# Altium footprint library DIM.PcbLib: 183 footprints (part 9 of 12)
Each footprint in its own frame and in the unit in brackets; x right, y up, seen from the top. Pads: shape width x height; smd on the part's side, far side on the other; paste and mask are expansions set on the pad; w line width, h text height; cw(c..) or ccw(c..) is an arc to the next point about the centre after c.
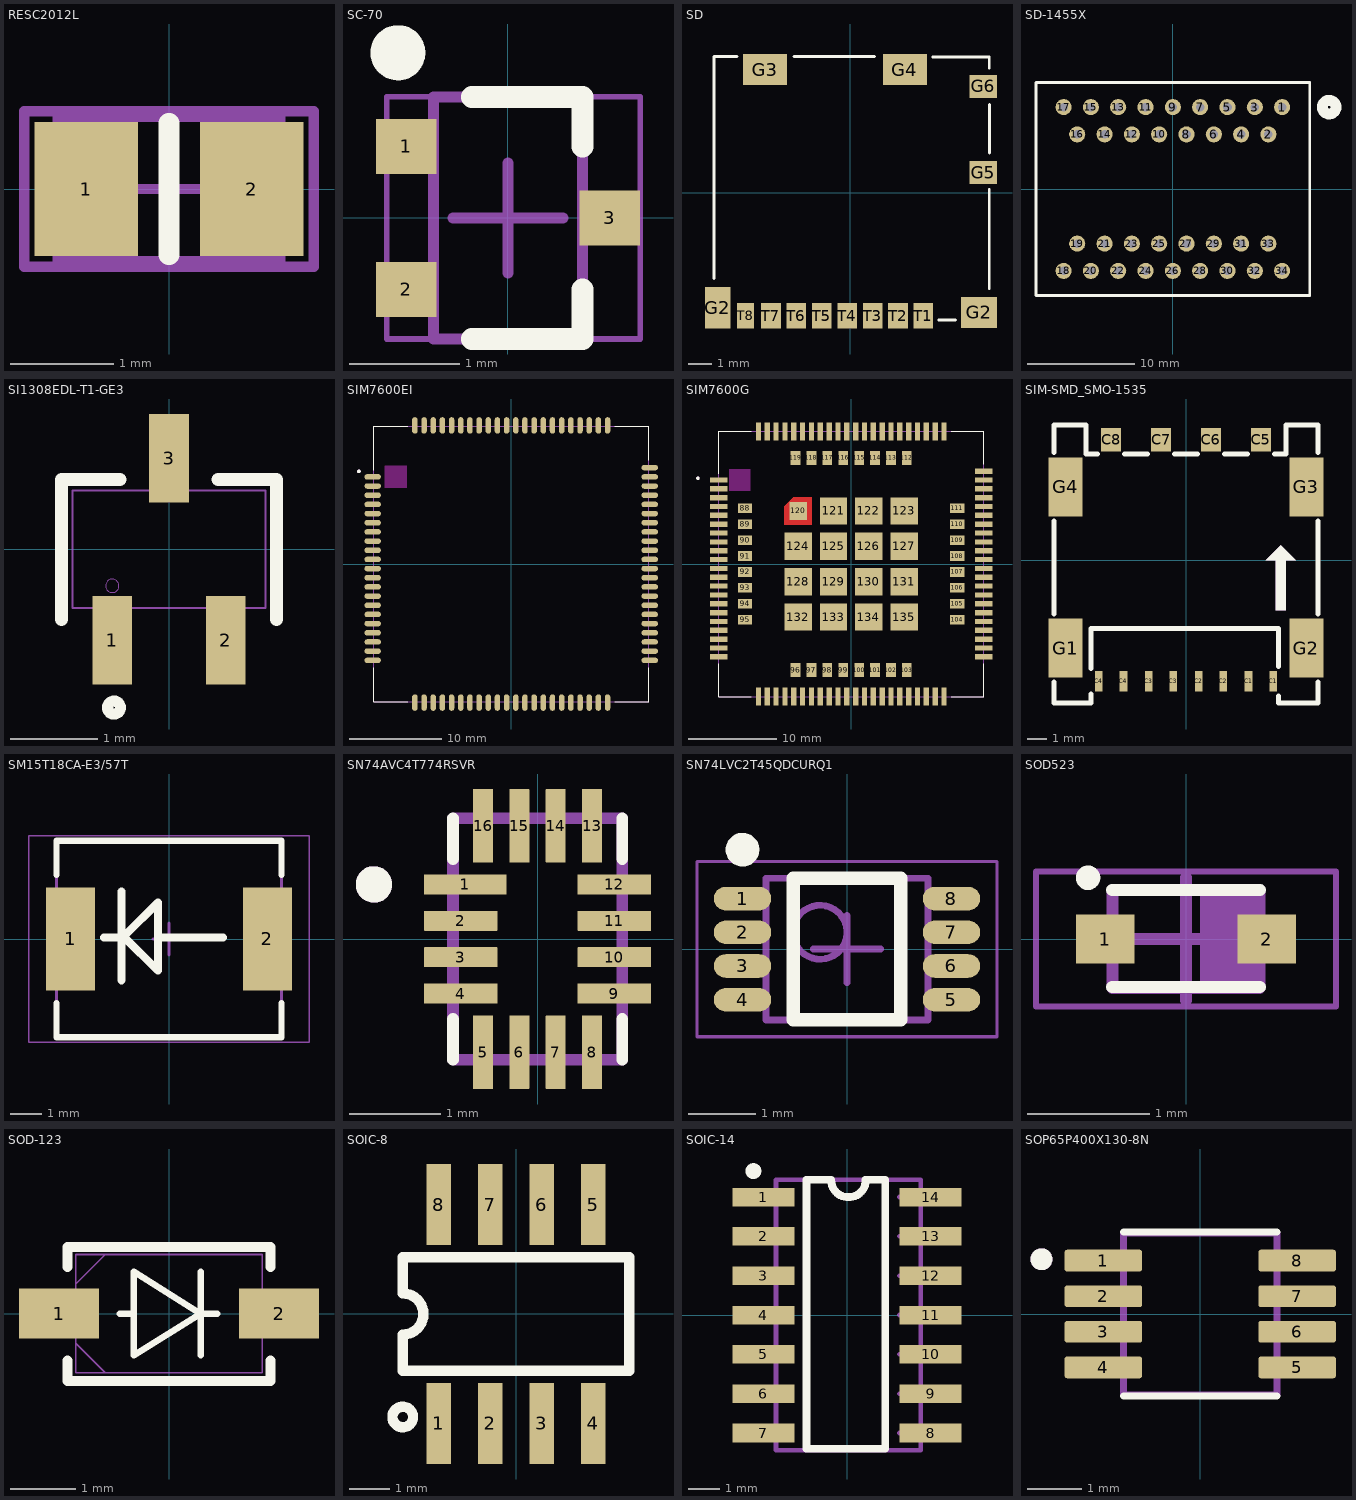
[diagram p8: the footprints below, top view; thin cyan lines are the x and y axes]

## RESC2012L [mm] "Chip Resistor, Body 2.0x1.3mm, IPC High Density"
height 0.65
pads (2):
  rect 1x1.3 smd: 1(-0.8,0) 2(0.8,0)
Top Overlay:
  lines w0.2: 0,-0.635 0,0.635
Mechanical 13:
  lines w0.1: -1.075,-0.7 1.075,-0.7 1.075,0.7 -1.075,0.7 -1.075,-0.7
Mechanical 15:
  lines w0.1: -0.5,0 0.5,0 ; 0,-0.5 0,0.5 ; -1.4,-0.75 1.4,-0.75 1.4,0.75 -1.4,0.75 -1.4,-0.75
3D body: height 0.65, standoff 0, extent -1.075,-0.7 1.075,0.7

## SC-70 [mm]
height 1.1
pads (3):
  rect 0.55x0.5 smd: 1(-0.925,0.65) 2(-0.925,-0.65) 3(0.925,0)
Top Overlay:
  circle w0.25: c-1,1.5 r0.125
  lines w0.2: -0.325,-1.1 0.675,-1.1 0.675,-0.65 ; -0.325,1.1 0.675,1.1 0.675,0.65
Mechanical 13:
  lines w0.1: -0.675,-1.1 -0.675,1.1 0.675,1.1 0.675,-1.1 -0.675,-1.1
Mechanical 15:
  lines w0.05: -1.1,-1.1 -1.1,1.1 1.2,1.1 1.2,-1.1 -1.1,-1.1
  lines w0.1: -0.5,0 0.5,0 ; 0,-0.5 0,0.5
3D body: height 1.1, standoff 0.15, extent -0.675,-1.1 0.675,1.1

## SD [mm]
pads (14):
  rect 1.11x1.8 smd: G2(-5.742,-4.98)
  rect 1.55x1.35 smd: G2(5.568,-5.185)
  rect 1.9x1.35 smd: G3(-3.697,5.325) G4(2.353,5.325)
  rect 1.2x1 smd: G5(5.743,0.865) G6(5.743,4.595)
  rect 0.85x1.1 smd: T1(3.158,-5.325) T2(2.058,-5.325) T3(0.958,-5.325) T4(-0.142,-5.325) T5(-1.242,-5.325) T6(-2.342,-5.325) T7(-3.442,-5.325)
  rect 0.75x1.1 smd: T8(-4.542,-5.325)
Top Overlay:
  lines w0.127: -5.912,-3.72 -5.912,5.895 -4.917,5.895 ; -2.437,5.895 1.033,5.895 ; 3.563,5.88 6.008,5.88 6.008,5.385 ; 3.823,-5.515 4.553,-5.515 ; 6.008,-4.14 6.008,0.135 ; 6.023,1.72 6.023,3.82
3D body "1040310811.stp": height 1.44, standoff -0.01, extent -5.932,-5.52 6.018,5.88

## SD-1455X [mm]
pads (34):
  round 1.5 hole 0.8: 1(10.16,7.62) 2(8.89,5.08) 3(7.62,7.62) 4(6.35,5.08) 5(5.08,7.62) 6(3.81,5.08) 7(2.54,7.62) 8(1.27,5.08) 9(0,7.62) 10(-1.27,5.08) 11(-2.54,7.62) 12(-3.81,5.08) 13(-5.08,7.62) 14(-6.35,5.08) 15(-7.62,7.62) 16(-8.89,5.08) 17(-10.16,7.62) 18(-10.16,-7.62) 19(-8.89,-5.08) 20(-7.62,-7.62) 21(-6.35,-5.08) 22(-5.08,-7.62) 23(-3.81,-5.08) 24(-2.54,-7.62) 25(-1.27,-5.08) 26(0,-7.62) 27(1.27,-5.08) 28(2.54,-7.62) 29(3.81,-5.08) 30(5.08,-7.62) 31(6.35,-5.08) 32(7.62,-7.62) 33(8.89,-5.08) 34(10.16,-7.62)
Top Overlay:
  circle w1: c14.537,7.612 r0.635
  lines w0.254: -12.725,-9.905 -12.725,9.905 ; -12.625,-9.905 12.625,-9.905 ; -12.625,9.905 12.625,9.905 ; 12.725,-9.905 12.725,9.905
3D body: height 5.33, standoff 0, extent -12.611,-9.884 12.613,9.882

## SI1308EDL-T1-GE3 [mil]
pads (3):
  rect 18x40 smd paste+0: 1(-25.59,-41) 2(25.59,-41) 3(0,41)
Top Overlay:
  circle w5: c-24.8,-71.4 r2.9
  lines w6: -48.5,-31.5 -48.5,31.5 -22.1,31.5 ; 22.1,31.5 48.5,31.5 48.5,-31.5
Mechanical 13:
  circle w0: c-25.59,-16.5 r3
  lines w1: -43.5,-26.5 43.5,-26.5 43.5,26.5 -43.5,26.5 -43.5,-26.5 ; -33.59,-47 -33.59,-26.5 -17.59,-26.5 -17.59,-47 -33.59,-47 ; -8,26.5 8,26.5 8,47 -8,47 -8,26.5 ; 17.59,-47 17.59,-26.5 33.59,-26.5 33.59,-47 17.59,-47
3D body "MOSFET_8EDL-T1-GE3_VIS.step": height 39.09, standoff 0, extent -43.5,-47.01 43.5,47.01

## SIM7600EI [mm]
pads (87):
  oval 1.8x0.6 smd: 1(-15.1,9.5) 2(-15.1,8.5) 3(-15.1,7.5) 4(-15.1,6.5) 5(-15.1,5.5) 6(-15.1,4.5) 7(-15.1,3.5) 8(-15.1,2.5) 9(-15.1,1.5) 10(-15.1,0.5) 11(-15.1,-0.5) 12(-15.1,-1.5) 13(-15.1,-2.5) 14(-15.1,-3.5) 15(-15.1,-4.5) 16(-15.1,-5.5) 17(-15.1,-6.5) 18(-15.1,-7.5) 19(-15.1,-8.5) 20(-15.1,-9.5) 41(15.1,-9.5) 42(15.1,-8.5) 43(15.1,-7.5) 44(15.1,-6.5) 45(15.1,-5.5) 46(15.1,-4.5) 47(15.1,-3.5) 48(15.1,-2.5) 49(15.1,-1.5) 50(15.1,-0.5) 51(15.1,0.5) 52(15.1,1.5) 53(15.1,2.5) 54(15.1,3.5) 55(15.1,4.5) 56(15.1,5.5) 57(15.1,6.5) 58(15.1,7.5) 59(15.1,8.5) 60(15.1,9.5) 81(-15.1,-10.5) 82(15.1,-10.5) 85(15.1,10.5)
  oval 0.6x1.8 smd: 21(-9.5,-15.1) 22(-8.5,-15.1) 23(-7.5,-15.1) 24(-6.5,-15.1) 25(-5.5,-15.1) 26(-4.5,-15.1) 27(-3.5,-15.1) 28(-2.5,-15.1) 29(-1.5,-15.1) 30(-0.5,-15.1) 31(0.5,-15.1) 32(1.5,-15.1) 33(2.5,-15.1) 34(3.5,-15.1) 35(4.5,-15.1) 36(5.5,-15.1) 37(6.5,-15.1) 38(7.5,-15.1) 39(8.5,-15.1) 40(9.5,-15.1) 61(9.5,15.1) 62(8.5,15.1) 63(7.5,15.1) 64(6.5,15.1) 65(5.5,15.1) 66(4.5,15.1) 67(3.5,15.1) 68(2.5,15.1) 69(1.5,15.1) 70(0.5,15.1) 71(-0.5,15.1) 72(-1.5,15.1) 73(-2.5,15.1) 74(-3.5,15.1) 75(-4.5,15.1) 76(-5.5,15.1) 77(-6.5,15.1) 78(-7.5,15.1) 79(-8.5,15.1) 80(-9.5,15.1) 83(10.5,-15.1) 84(-10.5,-15.1) 86(-10.5,15.1) 87(10.5,15.1)
Top Overlay:
  circle w0.2: c-16.6,10.1 r0.1
  lines w0.127: -15,-11.3 -15,-15 -11.3,-15 ; -15,10.2 -15,15 -11.3,15 ; 11.3,-15 15,-15 15,-11.3 ; 11.3,15 15,15 15,11.3
Keep-Out Layer:
  region: -11.4,8.3 -13.8,8.3 -13.8,10.7 -11.4,10.7
Mechanical 13:
  circle w0.2: c-16.6,10.1 r0.1
  lines w0.127: -15,-15 15,-15 15,15 -15,15 -15,-15
3D body "SIM7600E-H--3DModel-STEP-56544.STEP": height 3.1, standoff 0, extent -15,-15 15,15

## SIM7600G [mm]
pads (135):
  rect 2x0.6 smd paste-2: 1(-15,9.5) 2(-15,8.5) 3(-15,7.5) 4(-15,6.5) 5(-15,5.5) 6(-15,4.5) 7(-15,3.5) 8(-15,2.5) 9(-15,1.5) 10(-15,0.5) 11(-15,-0.5) 12(-15,-1.5) 13(-15,-2.5) 14(-15,-3.5) 15(-15,-4.5) 16(-15,-5.5) 17(-15,-6.5) 18(-15,-7.5) 19(-15,-8.5) 20(-15,-9.5) 41(15,-9.5) 42(15,-8.5) 43(15,-7.5) 44(15,-6.5) 45(15,-5.5) 46(15,-4.5) 47(15,-3.5) 48(15,-2.5) 49(15,-1.5) 50(15,-0.5) 51(15,0.5) 52(15,1.5) 53(15,2.5) 54(15,3.5) 55(15,4.5) 56(15,5.5) 57(15,6.5) 58(15,7.5) 59(15,8.5) 60(15,9.5) 81(-15,-10.5) 82(15,-10.5) 85(15,10.5)
  rect 0.6x2 smd paste-2: 21(-9.5,-15) 22(-8.5,-15) 23(-7.5,-15) 24(-6.5,-15) 25(-5.5,-15) 26(-4.5,-15) 27(-3.5,-15) 28(-2.5,-15) 29(-1.5,-15) 30(-0.5,-15) 31(0.5,-15) 32(1.5,-15) 33(2.5,-15) 34(3.5,-15) 35(4.5,-15) 36(5.5,-15) 37(6.5,-15) 38(7.5,-15) 39(8.5,-15) 40(9.5,-15) 61(9.5,15) 62(8.5,15) 63(7.5,15) 64(6.5,15) 65(5.5,15) 66(4.5,15) 67(3.5,15) 68(2.5,15) 69(1.5,15) 70(0.5,15) 71(-0.5,15) 72(-1.5,15) 73(-2.5,15) 74(-3.5,15) 75(-4.5,15) 76(-5.5,15) 77(-6.5,15) 78(-7.5,15) 79(-8.5,15) 80(-9.5,15) 83(10.5,-15) 84(-10.5,-15) 86(-10.5,15) 87(10.5,15)
  rect 1.6x1.1 smd paste-2: 88(-12,6.3) 89(-12,4.5) 90(-12,2.7) 91(-12,0.9) 92(-12,-0.9) 93(-12,-2.7) 94(-12,-4.5) 95(-12,-6.3) 104(12,-6.3) 105(12,-4.5) 106(12,-2.7) 107(12,-0.9) 108(12,0.9) 109(12,2.7) 110(12,4.5) 111(12,6.3)
  rect 1.1x1.6 smd paste-2: 96(-6.3,-12) 97(-4.5,-12) 98(-2.7,-12) 99(-0.9,-12) 100(0.9,-12) 101(2.7,-12) 102(4.5,-12) 103(6.3,-12) 112(6.3,12) 113(4.5,12) 114(2.7,12) 115(0.9,12) 116(-0.9,12) 117(-2.7,12) 118(-4.5,12) 119(-6.3,12)
  rect 2x2 smd paste-2 mask+0: 120(-6,6)
  rect 3.1x3.1 smd paste-3: 121(-2,6) 122(2,6) 123(6,6) 124(-6,2) 125(-2,2) 126(2,2) 127(6,2) 128(-6,-2) 129(-2,-2) 130(2,-2) 131(6,-2) 132(-6,-6) 133(-2,-6) 134(2,-6) 135(6,-6)
Top Layer:
  region: -4.45,4.45 -7.55,4.45 -7.55,6.55 -6.55,7.55 -4.45,7.55
Top Overlay:
  circle w0.2: c-17.35,9.7 r0.1
  lines w0.127: -15,-11.3 -15,-15 -11.3,-15 ; -15,10.2 -15,15 -11.3,15 ; 11.3,-15 15,-15 15,-11.3 ; 11.3,15 15,15 15,11.3
Top Paste:
  drawing of 215 lines, arcs and shapes, not listed
Top Solder:
  region: -4.35,4.35 -7.65,4.35 -7.65,6.65 -6.65,7.65 -4.35,7.65
Keep-Out Layer:
  region: -11.4,8.3 -13.8,8.3 -13.8,10.7 -11.4,10.7
  region: -11.4,8.3 -13.8,8.3 -13.8,10.7 -11.4,10.7
Mechanical 13:
  circle w0.2: c-17.35,9.7 r0.1
  lines w0.127: -15,-15 15,-15 15,15 -15,15 -15,-15
3D body "SIM7600G--3DModel-STEP-56544.STEP": height 3.1, standoff 0, extent -15,-15 15,15

## SIM-SMD_SMO-1535 [mm]
pads (16):
  rect 0.4x1.05 smd paste+0 mask+0.051: C1(3.185,-6.14) C1(4.435,-6.14) C2(0.645,-6.14) C2(1.895,-6.14) C3(-1.895,-6.14) C3(-0.645,-6.14) C4(-4.435,-6.14) C4(-3.185,-6.14)
  rect 1x1.2 smd paste+0 mask+0.051: C5(3.81,6.14) C6(1.27,6.14) C7(-1.27,6.14) C8(-3.81,6.14)
  rect 1.75x3 smd paste+0 mask+0.051: G1(-6.125,-4.46) G2(6.125,-4.46) G3(6.125,3.74) G4(-6.125,3.74)
Top Overlay:
  region: 4.572,-2.54 4.572,0 5.08,0 5.08,-2.54
  region: 4.064,0 5.588,0 4.826,0.762
  lines w0.254: -6.7,-6.191 -6.7,-7.26 -4.826,-7.26 -4.826,-6.793 ; -6.7,-2.729 -6.7,2.009 ; -6.7,5.471 -6.7,6.89 -5.08,6.89 -5.08,5.395 -4.49,5.395 ; -4.826,-5.487 -4.826,-3.473 4.699,-3.473 4.699,-5.393 ; -3.13,5.395 -1.95,5.395 ; -0.59,5.395 0.59,5.395 ; 1.95,5.395 3.13,5.395 ; 4.49,5.395 5.08,5.395 5.08,6.89 6.7,6.89 6.7,5.471 ; 4.699,-6.887 4.699,-7.26 6.7,-7.26 6.7,-6.191 ; 6.7,-2.729 6.7,2.009
Mechanical 15:
  region: 4.572,-2.54 4.572,0 5.08,0 5.08,-2.54
  region: 4.064,0 5.588,0 4.826,0.762

## SM15T18CA-E3/57T [mm]
height 2.62
pads (2):
  rect 1.55x3.25 smd: 1(-3.105,0) 2(3.105,0)
Top Overlay:
  lines w0.2: -3.55,-2.025 -3.55,-3.1 3.55,-3.1 3.55,-2.025 ; -3.55,2.025 -3.55,3.1 3.55,3.1 3.55,2.025
  lines w0.254: -2.05,0.05 -1.5,0.05 ; -1.5,1.5 -1.5,-1.3 -1.5,0.05 ; -1.4,0.1 -0.35,1.15 -0.35,-1 ; 1.7,0.05 -0.35,0.05 -0.35,-1 ; -1.5,0.05 -1.4,0.05 -0.35,-1
Mechanical 13:
  lines w0.1: -3.55,-3.11 -3.55,3.11 3.55,3.11 3.55,-3.11 -3.55,-3.11
Mechanical 15:
  lines w0.05: -4.425,-3.25 -4.425,3.25 4.425,3.25 4.425,-3.25 -4.425,-3.25
  lines w0.1: -0.5,0 0.5,0 ; 0,-0.5 0,0.5
3D body: height 2.62, standoff 0, extent -3.55,-3.11 3.55,3.11

## SN74AVC4T774RSVR [mm]
pads (16):
  rrect6% 0.91x0.22 smd: 1(-0.795,0.6)
  rrect6% 0.81x0.22 smd: 2(-0.845,0.2) 3(-0.845,-0.2) 4(-0.845,-0.6) 9(0.845,-0.6) 10(0.845,-0.2) 11(0.845,0.2) 12(0.845,0.6)
  rrect6% 0.22x0.81 smd: 5(-0.6,-1.245) 6(-0.2,-1.245) 7(0.2,-1.245) 8(0.6,-1.245) 13(0.6,1.245) 14(0.2,1.245) 15(-0.2,1.245) 16(-0.6,1.245)
Top Overlay:
  circle w0.2: c-1.8,0.6 r0.1
  lines w0.127: -0.93,-1.33 -0.93,-0.88 ; -0.93,0.88 -0.93,1.33 ; 0.93,-1.33 0.93,-0.88 ; 0.93,0.88 0.93,1.33
Mechanical 13:
  circle w0.2: c-1.8,0.6 r0.1
  lines w0.127: -0.93,-1.33 -0.93,1.33 0.93,1.33 0.93,-1.33 -0.93,-1.33

## SN74LVC2T45QDCURQ1 [mm]
height 0.9
pads (8):
  oval 0.85x0.35 smd: 1(-1.55,0.75) 2(-1.55,0.25) 3(-1.55,-0.25) 4(-1.55,-0.75) 5(1.55,-0.75) 6(1.55,-0.25) 7(1.55,0.25) 8(1.55,0.75)
Top Overlay:
  circle w0.25: c-1.55,1.475 r0.125
  lines w0.2: -0.8,-1.05 -0.8,1.05 0.8,1.05 0.8,-1.05 -0.8,-1.05
Mechanical 13:
  circle w0.1: c-0.4,0.25 r0.4
  lines w0.1: -1.2,-1.05 -1.2,1.05 1.2,1.05 1.2,-1.05 -1.2,-1.05
Mechanical 15:
  lines w0.05: -2.225,-1.3 -2.225,1.3 2.225,1.3 2.225,-1.3 -2.225,-1.3
  lines w0.1: -0.5,0 0.5,0 ; 0,-0.5 0,0.5
3D body: height 0.9, standoff 0.1, extent -1.2,-1.05 1.2,1.05

## SOD523 [mm] "SODFL, 2-Leads, Body 0.80x1.60mm, IPC Medium Density"
height 0.6
pads (2):
  rect 0.48x0.4 smd: 1(-0.66,0) 2(0.66,0)
Top Overlay:
  circle w0.1: c-0.8,0.5 r0.05
  lines w0.1: -0.603,-0.393 0.603,-0.393 ; -0.603,0.401 0.604,0.401
Mechanical 13:
  rectangle: 0.116,-0.424 0.6,0.4
  lines w0.1: -0.6,-0.4 -0.6,0.4 0.6,0.4 0.6,-0.4 -0.6,-0.4
Mechanical 15:
  lines w0.05: -1.225,-0.55 -1.225,0.55 1.225,0.55 1.225,-0.55 -1.225,-0.55
  lines w0.1: -0.5,0 0.5,0 ; 0,-0.5 0,0.5
3D body: height 0.6, standoff 0, extent -0.6,-0.4 0.6,0.4

## SOD-123 [mil]
pads (2):
  rect 48x30 smd paste+0 mask+4: 1(-66,0) 2(66,0)
Top Overlay:
  lines w3.94: -29.53,0 -21.06,0 ; 18.94,-25 18.94,0 ; 18.94,25 18.94,0 ; 28.94,0 18.94,0 ; 18.94,0 -21.06,-25 -21.06,25 18.94,0
  lines w6: -61,-28.1 -61,-40.5 61,-40.5 61,-28.1 ; -61,28.1 -61,40 61,40 61,28.1
Mechanical 13:
  lines w1: -56,-17.75 -38.25,-35.5 ; -56,17.75 -38.25,35.5 ; -76,-14 -76,14 -56,14 -56,-14 -76,-14 ; -56,-35.5 56,-35.5 56,35.5 -56,35.5 -56,-35.5 ; 56,-14 56,14 76,14 76,-14 56,-14
3D body "SOD-123_ONS.step": height 53.11, standoff 0, extent -75.98,-35.51 75.98,35.51

## SOIC-8 [mm]
pads (8):
  rect 0.6x2 smd: 1(-1.905,-2.7) 2(-0.635,-2.7) 3(0.635,-2.7) 4(1.905,-2.7) 5(1.905,2.7) 6(0.635,2.7) 7(-0.635,2.7) 8(-1.905,2.7)
Top Overlay:
  circle w0.254: c-2.794,-2.54 r0.254
  lines w0.254: -2.794,-1.397 -2.794,-0.508 ccw(c-2.794,0) -2.286,0 ccw(c-2.794,0) -2.794,0.508 -2.794,1.397 2.794,1.397 2.794,-1.397 -2.794,-1.397
3D body: height 2.5, standoff 0, extent -2.794,-1.524 2.794,1.524

## SOIC-14 [mm]
pads (14):
  rect 2x0.6 smd: 1(-2.7,3.81) 2(-2.7,2.54) 3(-2.7,1.27) 4(-2.7,0) 5(-2.7,-1.27) 6(-2.7,-2.54) 7(-2.7,-3.81) 8(2.7,-3.81) 9(2.7,-2.54) 10(2.7,-1.27) 11(2.7,0) 12(2.7,1.27) 13(2.7,2.54) 14(2.7,3.81)
Top Overlay:
  circle w0.254: c-3.023,4.648 r0.127
  lines w0.254: 0,3.81 cw(c0.025,4.343) -0.508,4.369 -1.303,4.369 -1.303,-4.318 1.237,-4.318 1.237,4.369 0.602,4.369 cw(c0.069,4.343) 0.094,3.81
Mechanical 13:
  lines w0.152: -2.7,-3.81 -2.294,-3.81 ; -2.7,-2.54 -2.294,-2.54 ; -2.7,-1.27 -2.294,-1.27 ; -2.7,0 -2.294,0 ; -2.7,1.27 -2.294,1.27 ; -2.7,2.54 -2.294,2.54 ; -2.7,3.81 -2.294,3.81 ; 1.694,-3.81 2.101,-3.81 ; 1.694,-2.54 2.101,-2.54 ; 1.694,-1.27 2.101,-1.27 ; 1.694,0 2.101,0 ; 1.694,1.27 2.101,1.27 ; 1.694,2.54 2.101,2.54 ; 1.694,3.81 2.101,3.81 ; -2.294,-4.369 2.38,-4.369 2.38,4.369 0.018,4.369 -0.592,4.369 -2.294,4.369 -2.294,-4.369
3D body: height 1.5, standoff 0, extent -2.286,-4.318 2.413,4.318

## SOP65P400X130-8N [mm]
pads (8):
  rrect25% 1.42x0.4 smd: 1(-1.77,0.975) 2(-1.77,0.325) 3(-1.77,-0.325) 4(-1.77,-0.975) 5(1.77,-0.975) 6(1.77,-0.325) 7(1.77,0.325) 8(1.77,0.975)
Top Overlay:
  circle w0.2: c-2.9,1 r0.1
  lines w0.127: -1.4,-1.495 1.4,-1.495 ; -1.4,1.495 1.4,1.495
Mechanical 13:
  circle w0.2: c-2.9,1 r0.1
  lines w0.127: -1.4,-1.475 -1.4,1.475 1.4,1.475 1.4,-1.475 -1.4,-1.475